# Altium footprint library SYNCBOX_TST.PcbLib: 267 footprints (part 16 of 17)
Each footprint in its own frame and in the unit in brackets; x right, y up, seen from the top. Pads: shape width x height; smd on the part's side, far side on the other; paste and mask are expansions set on the pad; w line width, h text height; cw(c..) or ccw(c..) is an arc to the next point about the centre after c.
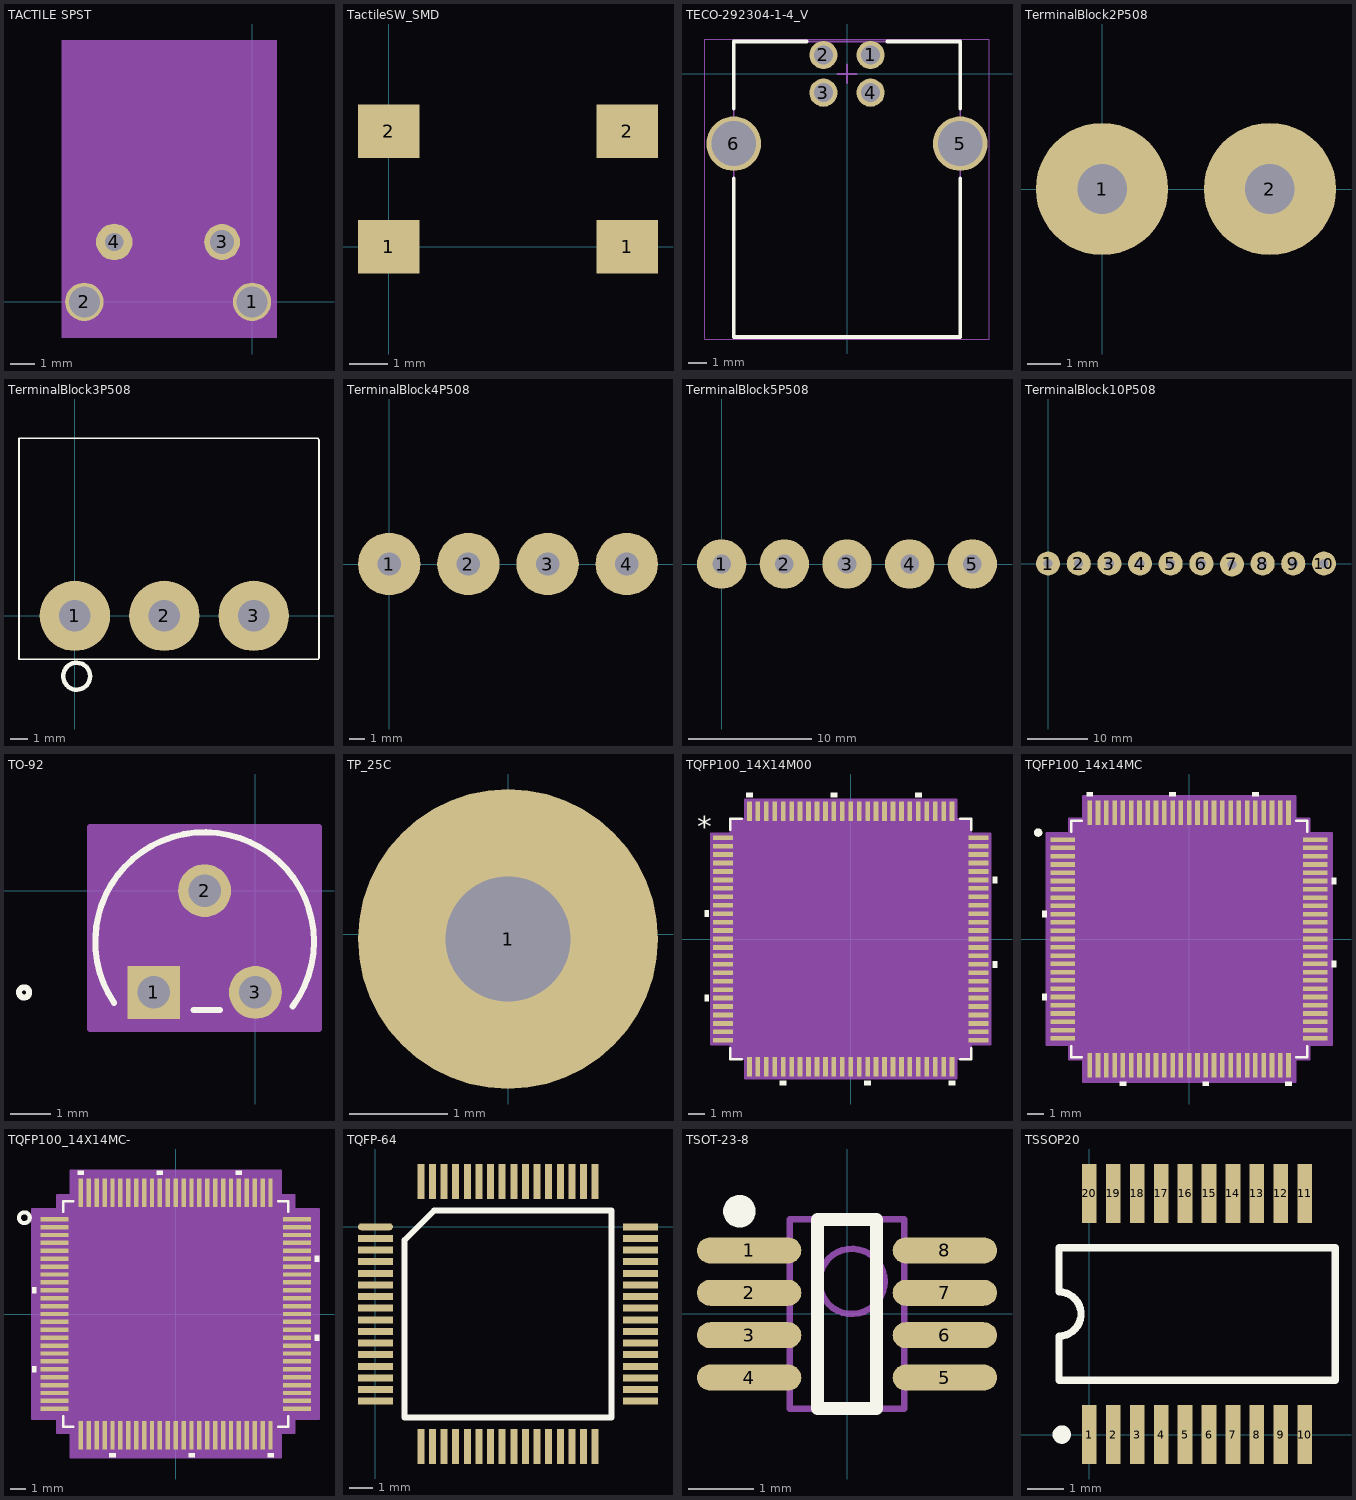
[diagram p15: the footprints below, top view; thin cyan lines are the x and y axes]

## TACTILE SPST [mm]
pads (4):
  round 1.6 hole 1.3: 1(0,0) 2(-7,0)
  round 1.5 hole 1: 3(-1.25,2.5)
  round 1.524 hole 0.762: 4(-5.75,2.5)
Bottom Overlay:
  lines w0.1: -7.976,-1.549 -7.976,10.973 -6.242,10.973 -1.759,10.973 1.041,10.973 1.041,-1.549 -7.976,-1.549
Mechanical 15:
  region: 1.041,10.922 -7.95,10.922 -7.95,-1.499 1.041,-1.499
3D body "TL1105SFxxxx.stp": height 7.11, standoff -3.89, extent -7.671,-1.451 0.726,10.849

## TactileSW_SMD [mm]
pads (4):
  rect 1.6x1.4 smd: 1(0,0) 1(6.2,0) 2(0,3) 2(6.2,3)
3D body "TL3305AFxxxxG.stp": height 3.7, standoff -0.1, extent -0.651,-0.751 6.849,3.749

## TECO-292304-1-4_V [mm] "THD, 4-Leads, Body 15.71x12.04mm, Pitch 2.5mm"
height 11.05
pads (6):
  round 1.5 hole 1: 1(1.25,1) 2(-1.25,1) 3(-1.25,-1) 4(1.25,-1)
  round 2.9 hole 2.38: 5(6.02,-3.71) 6(-6.02,-3.71)
Top Overlay:
  lines w0.2: -6.02,-5.56 -6.02,-13.99 6.02,-13.99 6.02,-5.56 ; -6.02,-1.86 -6.02,1.72 -2.147,1.72 ; 2.147,1.72 6.02,1.72 6.02,-1.86
Mechanical 13:
  lines w0.1: -6.02,-13.99 6.02,-13.99 6.02,1.72 -6.02,1.72 -6.02,-13.99
Mechanical 15:
  lines w0.05: -7.57,-14.09 7.57,-14.09 7.57,1.85 -7.57,1.85 -7.57,-14.09
  lines w0.1: -0.5,0 0.5,0 ; 0,-0.5 0,0.5
3D body: height 11.05, standoff 0, extent -6.02,-13.99 6.02,1.72

## TerminalBlock2P508 [mm] "2 Pin, 5.08 mm pitch Terminal Block"
pads (2):
  round 4 hole 1.5: 1(0,0) 2(5.08,0)

## TerminalBlock3P508 [mm] "3 Pin, 5.08 mm pitch Terminal Block"
pads (3):
  round 4 hole 1.778: 1(0,0) 2(5.08,0) 3(10.16,0)
Top Overlay:
  circle w0.254: c0.102,-3.429 r0.764
  lines w0.1: -3.175,-2.464 13.818,-2.464 13.868,-2.413 13.868,10.008 13.792,10.084 -3.175,10.084 -3.175,-2.464
3D body "c-796644-3-c1-3d.stp": height 8.31, standoff -3.54, extent -3.166,-1.942 13.834,10.058

## TerminalBlock4P508 [mm] "4 Pin, 5.08 mm pitch Terminal Block"
pads (4):
  round 4 hole 1.5: 1(0,0) 2(5.08,0) 3(10.16,0) 4(15.24,0)

## TerminalBlock5P508 [mm] "5 Pin, 5.08 mm pitch Terminal Block"
pads (5):
  round 4 hole 1.5: 1(0,0) 2(5.08,0) 3(10.16,0) 4(15.24,0) 5(20.32,0)
3D body "?????? 2EDG-5.08-05P.STEP": height 15.61, standoff 0, extent -3.2,-3.905 23.6,21.175

## TerminalBlock10P508 [mm] "10 Pin, 5.08 mm pitch Terminal Block"
pads (10):
  round 4 hole 1.5: 1(0,0) 2(5.08,0) 3(10.16,0) 4(15.24,0) 5(20.32,0) 6(25.4,0) 7(30.48,-0.15) 8(35.56,0) 9(40.64,0) 10(45.72,0)

## TO-92 [mil]
pads (3):
  rect 52x52 / inner round 60 / far side rect 52x52 hole 32 paste+0 mask+0: 1(-100,-100)
  round 52 / inner round 60 / far side round 52 hole 32 paste+0 mask+0: 2(-50,0) 3(0,-100)
Top Overlay:
  circle w6: c-227.5,-100 r5
  lines w6: -139.1,-110.15 cw(c-50,-50) 57.5,-50 cw(c-50,-50) 36.65,-113.63 ; -60.9,-117.5 -34.97,-117.5
Mechanical 13:
  circle w0: c-142.5,-100 r5
  lines w0: -131.24,-112.5 cw(c-50,-50) 31.24,-112.5
  lines w1: -131.24,-112.5 31.24,-112.5
  lines w6: -110,-100 -90,-100 ; -100,-110 -100,-90
Mechanical 15:
  region: 62.5,-136 -162.5,-136 -162.5,62.5 62.5,62.5
  lines w6: -162.5,-136 -162.5,62.5 62.5,62.5 62.5,-136 -162.5,-136
3D body: height 10, standoff 0, extent 0,0 10,10
3D body "TO-92.stp": height 290, standoff -107.99, extent -152.52,-112.52 52.52,52.52

## TP_25C [mil]
pads (1):
  round 120 hole 50 paste-25 mask+2: 1(0,-1.97)

## TQFP100_14X14M00 [mil]
pads (100):
  rect 46x11 smd paste+0 mask+0: 1(-298,236.22) 2(-298,216.54) 3(-298,196.85) 4(-298,177.17) 5(-298,157.48) 6(-298,137.8) 7(-298,118.11) 8(-298,98.43) 9(-298,78.74) 10(-298,59.06) 11(-298,39.37) 12(-298,19.69) 13(-298,0) 14(-298,-19.68) 15(-298,-39.37) 16(-298,-59.06) 17(-298,-78.74) 18(-298,-98.43) 19(-298,-118.11) 20(-298,-137.8) 21(-298,-157.48) 22(-298,-177.17) 23(-298,-196.85) 24(-298,-216.54) 25(-298,-236.22) 51(298,-236.22) 52(298,-216.54) 53(298,-196.85) 54(298,-177.17) 55(298,-157.48) 56(298,-137.8) 57(298,-118.11) 58(298,-98.43) 59(298,-78.74) 60(298,-59.06) 61(298,-39.37) 62(298,-19.68) 63(298,0) 64(298,19.68) 65(298,39.37) 66(298,59.06) 67(298,78.74) 68(298,98.43) 69(298,118.11) 70(298,137.8) 71(298,157.48) 72(298,177.17) 73(298,196.85) 74(298,216.54) 75(298,236.22)
  rect 11x46 smd paste+0 mask+0: 26(-236.22,-298) 27(-216.54,-298) 28(-196.85,-298) 29(-177.17,-298) 30(-157.48,-298) 31(-137.8,-298) 32(-118.11,-298) 33(-98.43,-298) 34(-78.74,-298) 35(-59.06,-298) 36(-39.37,-298) 37(-19.68,-298) 38(0,-298) 39(19.68,-298) 40(39.37,-298) 41(59.06,-298) 42(78.74,-298) 43(98.43,-298) 44(118.11,-298) 45(137.8,-298) 46(157.48,-298) 47(177.17,-298) 48(196.85,-298) 49(216.54,-298) 50(236.22,-298) 76(236.22,298) 77(216.54,298) 78(196.85,298) 79(177.17,298) 80(157.48,298) 81(137.8,298) 82(118.11,298) 83(98.43,298) 84(78.74,298) 85(59.06,298) 86(39.37,298) 87(19.68,298) 88(0,298) 89(-19.68,298) 90(-39.37,298) 91(-59.06,298) 92(-78.74,298) 93(-98.43,298) 94(-118.11,298) 95(-137.8,298) 96(-157.48,298) 97(-177.17,298) 98(-196.85,298) 99(-216.54,298) 100(-236.22,298)
Top Overlay:
  region: -228.72,331 -243.72,331 -243.72,341 -228.72,341
  region: -31.87,331 -46.87,331 -46.87,341 -31.87,341
  region: 164.98,331 149.98,331 149.98,341 164.98,341
  region: 331,145.3 341,145.3 341,130.3 331,130.3
  region: 331,-51.56 341,-51.56 341,-66.56 331,-66.56
  region: 243.72,-331 228.72,-331 228.72,-341 243.72,-341
  region: 46.87,-331 31.87,-331 31.87,-341 46.87,-341
  region: -149.98,-331 -164.98,-331 -164.98,-341 -149.98,-341
  region: -331,-130.3 -341,-130.3 -341,-145.3 -331,-145.3
  region: -331,66.56 -341,66.56 -341,51.56 -331,51.56
  lines w6: -280.5,-254.82 -280.5,-280.5 -254.82,-280.5 ; -280.5,254.82 -280.5,280.5 -254.82,280.5 ; 254.82,-280.5 280.5,-280.5 280.5,-254.82 ; 254.82,280.5 280.5,280.5 280.5,254.82
  text "*" at -358.5,236.06 h50
Mechanical 13:
  drawing of 405 lines, arcs and shapes, not listed
  text "*" at -273,221.06 h50
Mechanical 15:
  region: -245.72,-279.5 -279.5,-279.5 -279.5,-245.72 -325,-245.72 -325,245.72 -279.5,245.72 -279.5,279.5 -245.72,279.5 -245.72,325 245.72,325 245.72,279.5 279.5,279.5 279.5,245.72 325,245.72 325,-245.72 279.5,-245.72 279.5,-279.5 245.72,-279.5 245.72,-325 -245.72,-325
  lines w6: -325,-245.72 -325,245.72 -279.5,245.72 -279.5,279.5 -245.72,279.5 -245.72,325 245.72,325 245.72,279.5 279.5,279.5 279.5,245.72 325,245.72 325,-245.72 279.5,-245.72 279.5,-279.5 245.72,-279.5 245.72,-325 -245.72,-325 -245.72,-279.5 -279.5,-279.5 -279.5,-245.72 -325,-245.72
3D body "TQFP100_14x14MC.stp": height 47.09, standoff 0, extent -314.99,-309.99 315,320
3D body: height 10, standoff 0, extent 0,0 10,10

## TQFP100_14x14MC [mil]
pads (100):
  rect 58x11 smd paste+0 mask+0: 1(-300,236.22) 2(-300,216.54) 3(-300,196.85) 4(-300,177.17) 5(-300,157.48) 6(-300,137.8) 7(-300,118.11) 8(-300,98.43) 9(-300,78.74) 10(-300,59.06) 11(-300,39.37) 12(-300,19.69) 13(-300,0) 14(-300,-19.68) 15(-300,-39.37) 16(-300,-59.06) 17(-300,-78.74) 18(-300,-98.43) 19(-300,-118.11) 20(-300,-137.8) 21(-300,-157.48) 22(-300,-177.17) 23(-300,-196.85) 24(-300,-216.54) 25(-300,-236.22) 51(300,-236.22) 52(300,-216.54) 53(300,-196.85) 54(300,-177.17) 55(300,-157.48) 56(300,-137.8) 57(300,-118.11) 58(300,-98.43) 59(300,-78.74) 60(300,-59.06) 61(300,-39.37) 62(300,-19.68) 63(300,0) 64(300,19.68) 65(300,39.37) 66(300,59.06) 67(300,78.74) 68(300,98.43) 69(300,118.11) 70(300,137.8) 71(300,157.48) 72(300,177.17) 73(300,196.85) 74(300,216.54) 75(300,236.22)
  rect 11x58 smd paste+0 mask+0: 26(-236.22,-300) 27(-216.54,-300) 28(-196.85,-300) 29(-177.17,-300) 30(-157.48,-300) 31(-137.8,-300) 32(-118.11,-300) 33(-98.43,-300) 34(-78.74,-300) 35(-59.06,-300) 36(-39.37,-300) 37(-19.68,-300) 38(0,-300) 39(19.68,-300) 40(39.37,-300) 41(59.06,-300) 42(78.74,-300) 43(98.43,-300) 44(118.11,-300) 45(137.8,-300) 46(157.48,-300) 47(177.17,-300) 48(196.85,-300) 49(216.54,-300) 50(236.22,-300) 76(236.22,300) 77(216.54,300) 78(196.85,300) 79(177.17,300) 80(157.48,300) 81(137.8,300) 82(118.11,300) 83(98.43,300) 84(78.74,300) 85(59.06,300) 86(39.37,300) 87(19.68,300) 88(0,300) 89(-19.68,300) 90(-39.37,300) 91(-59.06,300) 92(-78.74,300) 93(-98.43,300) 94(-118.11,300) 95(-137.8,300) 96(-157.48,300) 97(-177.17,300) 98(-196.85,300) 99(-216.54,300) 100(-236.22,300)
Top Overlay:
  circle w10: c-359,253 r5
  region: -339,66.56 -349,66.56 -349,51.56 -339,51.56
  region: -339,-130.3 -349,-130.3 -349,-145.3 -339,-145.3
  region: -149.98,-339 -164.98,-339 -164.98,-349 -149.98,-349
  region: 46.87,-339 31.87,-339 31.87,-349 46.87,-349
  region: 243.72,-339 228.72,-339 228.72,-349 243.72,-349
  region: 339,-51.56 349,-51.56 349,-66.56 339,-66.56
  region: 339,145.3 349,145.3 349,130.3 339,130.3
  region: 164.98,339 149.98,339 149.98,349 164.98,349
  region: -31.87,339 -46.87,339 -46.87,349 -31.87,349
  region: -228.72,339 -243.72,339 -243.72,349 -228.72,349
  lines w6: -280.5,-254.82 -280.5,-280.5 -254.82,-280.5 ; -280.5,254.82 -280.5,280.5 -254.82,280.5 ; 254.82,-280.5 280.5,-280.5 280.5,-254.82 ; 254.82,280.5 280.5,280.5 280.5,254.82
Mechanical 13:
  drawing of 405 lines, arcs and shapes, not listed
  text "*" at -273,221.06 h50
Mechanical 15:
  region: -251.72,-285.5 -285.5,-285.5 -285.5,-251.72 -339,-251.72 -339,251.72 -285.5,251.72 -285.5,285.5 -251.72,285.5 -251.72,339 251.72,339 251.72,285.5 285.5,285.5 285.5,251.72 339,251.72 339,-251.72 285.5,-251.72 285.5,-285.5 251.72,-285.5 251.72,-339 -251.72,-339
  lines w6: -339,-251.72 -285.5,-251.72 -285.5,-285.5 -251.72,-285.5 -251.72,-339 251.72,-339 251.72,-285.5 285.5,-285.5 285.5,-251.72 339,-251.72 339,251.72 285.5,251.72 285.5,285.5 251.72,285.5 251.72,339 -251.72,339 -251.72,285.5 -285.5,285.5 -285.5,251.72 -339,251.72 -339,-251.72
3D body "TQFP100_14X14MC-L.stp": height 47.09, standoff 0, extent -314.99,-314.99 315.01,315
3D body: height 10, standoff 0, extent 0,0 10,10

## TQFP100_14X14MC- [mil]
pads (100):
  rect 70x11 smd paste+0 mask+0: 1(-302,236.22) 2(-302,216.54) 3(-302,196.85) 4(-302,177.17) 5(-302,157.48) 6(-302,137.8) 7(-302,118.11) 8(-302,98.43) 9(-302,78.74) 10(-302,59.06) 11(-302,39.37) 12(-302,19.69) 13(-302,0) 14(-302,-19.68) 15(-302,-39.37) 16(-302,-59.06) 17(-302,-78.74) 18(-302,-98.43) 19(-302,-118.11) 20(-302,-137.8) 21(-302,-157.48) 22(-302,-177.17) 23(-302,-196.85) 24(-302,-216.54) 25(-302,-236.22) 51(302,-236.22) 52(302,-216.54) 53(302,-196.85) 54(302,-177.17) 55(302,-157.48) 56(302,-137.8) 57(302,-118.11) 58(302,-98.43) 59(302,-78.74) 60(302,-59.06) 61(302,-39.37) 62(302,-19.68) 63(302,0) 64(302,19.68) 65(302,39.37) 66(302,59.06) 67(302,78.74) 68(302,98.43) 69(302,118.11) 70(302,137.8) 71(302,157.48) 72(302,177.17) 73(302,196.85) 74(302,216.54) 75(302,236.22)
  rect 11x70 smd paste+0 mask+0: 26(-236.22,-302) 27(-216.54,-302) 28(-196.85,-302) 29(-177.17,-302) 30(-157.48,-302) 31(-137.8,-302) 32(-118.11,-302) 33(-98.43,-302) 34(-78.74,-302) 35(-59.06,-302) 36(-39.37,-302) 37(-19.68,-302) 38(0,-302) 39(19.68,-302) 40(39.37,-302) 41(59.06,-302) 42(78.74,-302) 43(98.43,-302) 44(118.11,-302) 45(137.8,-302) 46(157.48,-302) 47(177.17,-302) 48(196.85,-302) 49(216.54,-302) 50(236.22,-302) 76(236.22,302) 77(216.54,302) 78(196.85,302) 79(177.17,302) 80(157.48,302) 81(137.8,302) 82(118.11,302) 83(98.43,302) 84(78.74,302) 85(59.06,302) 86(39.37,302) 87(19.68,302) 88(0,302) 89(-19.68,302) 90(-39.37,302) 91(-59.06,302) 92(-78.74,302) 93(-98.43,302) 94(-118.11,302) 95(-137.8,302) 96(-157.48,302) 97(-177.17,302) 98(-196.85,302) 99(-216.54,302) 100(-236.22,302)
Top Overlay:
  circle w10: c-377,240 r13.45
  region: -228.72,347 -243.72,347 -243.72,357 -228.72,357
  region: -31.87,347 -46.87,347 -46.87,357 -31.87,357
  region: 164.98,347 149.98,347 149.98,357 164.98,357
  region: 347,145.3 357,145.3 357,130.3 347,130.3
  region: 347,-51.56 357,-51.56 357,-66.56 347,-66.56
  region: 243.72,-347 228.72,-347 228.72,-357 243.72,-357
  region: 46.87,-347 31.87,-347 31.87,-357 46.87,-357
  region: -149.98,-347 -164.98,-347 -164.98,-357 -149.98,-357
  region: -347,-130.3 -357,-130.3 -357,-145.3 -347,-145.3
  region: -347,66.56 -357,66.56 -357,51.56 -347,51.56
  lines w6: -280.5,-254.82 -280.5,-280.5 -254.82,-280.5 ; -280.5,254.82 -280.5,280.5 -254.82,280.5 ; 254.82,-280.5 280.5,-280.5 280.5,-254.82 ; 254.82,280.5 280.5,280.5 280.5,254.82
Mechanical 13:
  drawing of 405 lines, arcs and shapes, not listed
  text "*" at -273,221.06 h50
Mechanical 15:
  region: -261.72,-295.5 -295.5,-295.5 -295.5,-261.72 -357,-261.72 -357,261.72 -295.5,261.72 -295.5,295.5 -261.72,295.5 -261.72,357 261.72,357 261.72,295.5 295.5,295.5 295.5,261.72 357,261.72 357,-261.72 295.5,-261.72 295.5,-295.5 261.72,-295.5 261.72,-357 -261.72,-357
  lines w6: -357,-261.72 -357,261.72 -295.5,261.72 -295.5,295.5 -261.72,295.5 -261.72,357 261.72,357 261.72,295.5 295.5,295.5 295.5,261.72 357,261.72 357,-261.72 295.5,-261.72 295.5,-295.5 261.72,-295.5 261.72,-357 -261.72,-357 -261.72,-295.5 -295.5,-295.5 -295.5,-261.72 -357,-261.72
3D body "TQFP100_14X14MC-M.stp": height 47.09, standoff 0, extent -315,-315 315,315
3D body: height 10, standoff 0, extent 0,0 10,10

## TQFP-64 [mm]
pads (64):
  oval 1.5x0.3 smd: 1(0,0)
  rect 1.5x0.3 smd: 2(0,-0.5) 3(0,-1) 4(0,-1.5) 5(0,-2) 6(0,-2.5) 7(0,-3) 8(0,-3.5) 9(0,-4) 10(0,-4.5) 11(0,-5) 12(0,-5.5) 13(0,-6) 14(0,-6.5) 15(0,-7) 16(0,-7.5) 33(11.4,-7.5) 34(11.4,-7) 35(11.4,-6.5) 36(11.4,-6) 37(11.4,-5.5) 38(11.4,-5) 39(11.4,-4.5) 40(11.4,-4) 41(11.4,-3.5) 42(11.4,-3) 43(11.4,-2.5) 44(11.4,-2) 45(11.4,-1.5) 46(11.4,-1) 47(11.4,-0.5) 48(11.4,0)
  rect 0.3x1.5 smd: 17(1.95,-9.45) 18(2.45,-9.45) 19(2.95,-9.45) 20(3.45,-9.45) 21(3.95,-9.45) 22(4.45,-9.45) 23(4.95,-9.45) 24(5.45,-9.45) 25(5.95,-9.45) 26(6.45,-9.45) 27(6.95,-9.45) 28(7.45,-9.45) 29(7.95,-9.45) 30(8.45,-9.45) 31(8.95,-9.45) 32(9.45,-9.45) 49(9.45,1.95) 50(8.95,1.95) 51(8.45,1.95) 52(7.95,1.95) 53(7.45,1.95) 54(6.95,1.95) 55(6.45,1.95) 56(5.95,1.95) 57(5.45,1.95) 58(4.95,1.95) 59(4.45,1.95) 60(3.95,1.95) 61(3.45,1.95) 62(2.95,1.95) 63(2.45,1.95) 64(1.95,1.95)
Top Overlay:
  lines w0.254: 1.258,-8.192 10.142,-8.192 10.142,0.692 2.516,0.692 1.258,-0.566 1.258,-8.192

## TSOT-23-8 [mm]
height 1
pads (8):
  oval 1.6x0.4 smd: 1(-1.5,0.975) 2(-1.5,0.325) 3(-1.5,-0.325) 4(-1.5,-0.975) 5(1.5,-0.975) 6(1.5,-0.325) 7(1.5,0.325) 8(1.5,0.975)
Top Overlay:
  circle w0.25: c-1.65,1.575 r0.125
  lines w0.2: -0.45,-1.45 -0.45,1.45 0.45,1.45 0.45,-1.45 -0.45,-1.45
Mechanical 13:
  circle w0.1: c0.075,0.5 r0.5
  lines w0.1: -0.875,-1.45 -0.875,1.45 0.875,1.45 0.875,-1.45 -0.875,-1.45
3D body: height 1, standoff 0.01, extent -0.875,-1.45 0.875,1.45

## TSSOP20 [mm] "SO20 - 20 Leads; Body Width 7.5 mm; Pitch 1.27 mm"
height 1.27
pads (20):
  rect 0.4x1.6 smd: 1(0,0) 2(0.65,0) 3(1.3,0) 4(1.95,0) 5(2.6,0) 6(3.25,0) 7(3.9,0) 8(4.55,0) 9(5.2,0) 10(5.85,0) 11(5.85,6.55) 12(5.2,6.55) 13(4.55,6.55) 14(3.9,6.55) 15(3.25,6.55) 16(2.6,6.55) 17(1.95,6.55) 18(1.3,6.55) 19(0.65,6.55) 20(0,6.55)
Top Overlay:
  circle w0.25: c-0.75,0 r0.125
  lines w0.2: -0.825,1.475 6.675,1.475 6.675,5.075 -0.825,5.075 -0.825,3.875 cw(c-0.825,3.275) -0.825,2.675 -0.825,1.475
3D body: height 1.2, standoff 0, extent -0.385,1 6.2,5.5
3D body: height 0.2, standoff 0, extent -0.095,0 0.105,1
3D body: height 0.2, standoff 0, extent 0.555,0 0.755,1
3D body: height 0.2, standoff 0, extent 1.205,0 1.405,1
3D body: height 0.2, standoff 0, extent 1.855,0 2.055,1
3D body: height 0.2, standoff 0, extent 2.505,0 2.705,1
3D body: height 0.2, standoff 0, extent 3.155,0 3.355,1
3D body: height 0.2, standoff 0, extent 3.805,0 4.005,1
3D body: height 0.2, standoff 0, extent 4.455,0 4.655,1
3D body: height 0.2, standoff 0, extent 5.105,0 5.305,1
3D body: height 0.2, standoff 0, extent 5.755,0 5.955,1
3D body: height 0.2, standoff 0, extent -0.105,5.5 0.095,6.5
3D body: height 0.2, standoff 0, extent 0.545,5.5 0.745,6.5
3D body: height 0.2, standoff 0, extent 1.195,5.5 1.395,6.5
3D body: height 0.2, standoff 0, extent 1.845,5.5 2.045,6.5
3D body: height 0.2, standoff 0, extent 2.495,5.5 2.695,6.5
3D body: height 0.2, standoff 0, extent 3.145,5.5 3.345,6.5
3D body: height 0.2, standoff 0, extent 3.795,5.5 3.995,6.5
3D body: height 0.2, standoff 0, extent 4.445,5.5 4.645,6.5
3D body: height 0.2, standoff 0, extent 5.095,5.5 5.295,6.5
3D body: height 0.2, standoff 0, extent 5.745,5.5 5.945,6.5
3D body: height 1.4, standoff 0.2, extent -0.075,1.79 0.323,2.189